# Altium schematic symbol library 1123.SchLib: 1 symbol
Pins are listed as number, name and electrical type; pins without a type are passive.

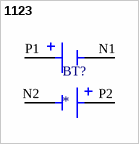
[diagram p0: symbol 1123]

## 1123
designator BT?
THM Dual Holder for 20700 & 21700 Cell w/ coil spring; MF: Keystone Electronics; MP: 1123; SnapEDA_Link: https://www.snapeda.com/parts/1123/Keystone/view-part/?ref=snap; Package: None; Value: *; Check_prices: https://www.snapeda.com/parts/1123/Keystone/view-part/?ref=eda
footprint BAT_1123
pins: N1 NEG1, N2 NEG2, P1 POS1, P2 POS2